# Altium integrated library AMPLA7050S220MT.IntLib: 1 symbol
Pins are listed as number, name and electrical type; pins without a type are passive.

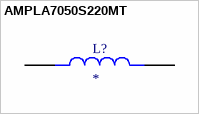
[diagram p0: symbol AMPLA7050S220MT]

## AMPLA7050S220MT
designator L?
INDUCTOR, 22UH, SHIELDED, 2.5A; Inductance:22ÂµH; RMS Current (Irms):2.5A; Inductor Construction:Shielded; Saturation Current (Isat):5.5A; Product Range:AMPLA7050S Series; Power Inductor Case:7.3mm x 6.6mm x 4.8mm RoHS Compliant: Yes; MF: Abracon; MP: AMPLA7050S220MT; SnapEDA_Link: https://www.snapeda.com/parts/AMPLA7050S220MT/Abracon/view-part/?ref=snap; Package: Package; Value: *; Check_prices: https://www.snapeda.com/parts/AMPLA7050S220MT/Abracon/view-part/?ref=eda
footprint IND_AMPLA7050S220MT
pins: 1, 2